# Altium schematic symbol library STX-3000.SchLib: 1 symbol
Pins are listed as number, name and electrical type; pins without a type are passive.

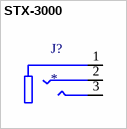
[diagram p0: symbol STX-3000]

## STX-3000
designator J?
3.50mm (0.141, 1/8, Mini Plug) - Headphone Phone Jack Stereo (3 Conductor, TRS) Connector Kinked Pin; MF: Kycon; SnapEDA_Link: https://www.snapeda.com/parts/STX-3000/Kycon/view-part/?ref=snap; Package: None; Value: *; MP: STX-3000; Check_prices: https://www.snapeda.com/parts/STX-3000/Kycon/view-part/?ref=eda
footprint KYCON_STX-3000
pins: 1, 2, 3